# Altium footprint library Ezlo.PcbLib: 103 footprints (part 6 of 7)
Each footprint in its own frame and in the unit in brackets; x right, y up, seen from the top. Pads: shape width x height; smd on the part's side, far side on the other; paste and mask are expansions set on the pad; w line width, h text height; cw(c..) or ccw(c..) is an arc to the next point about the centre after c.
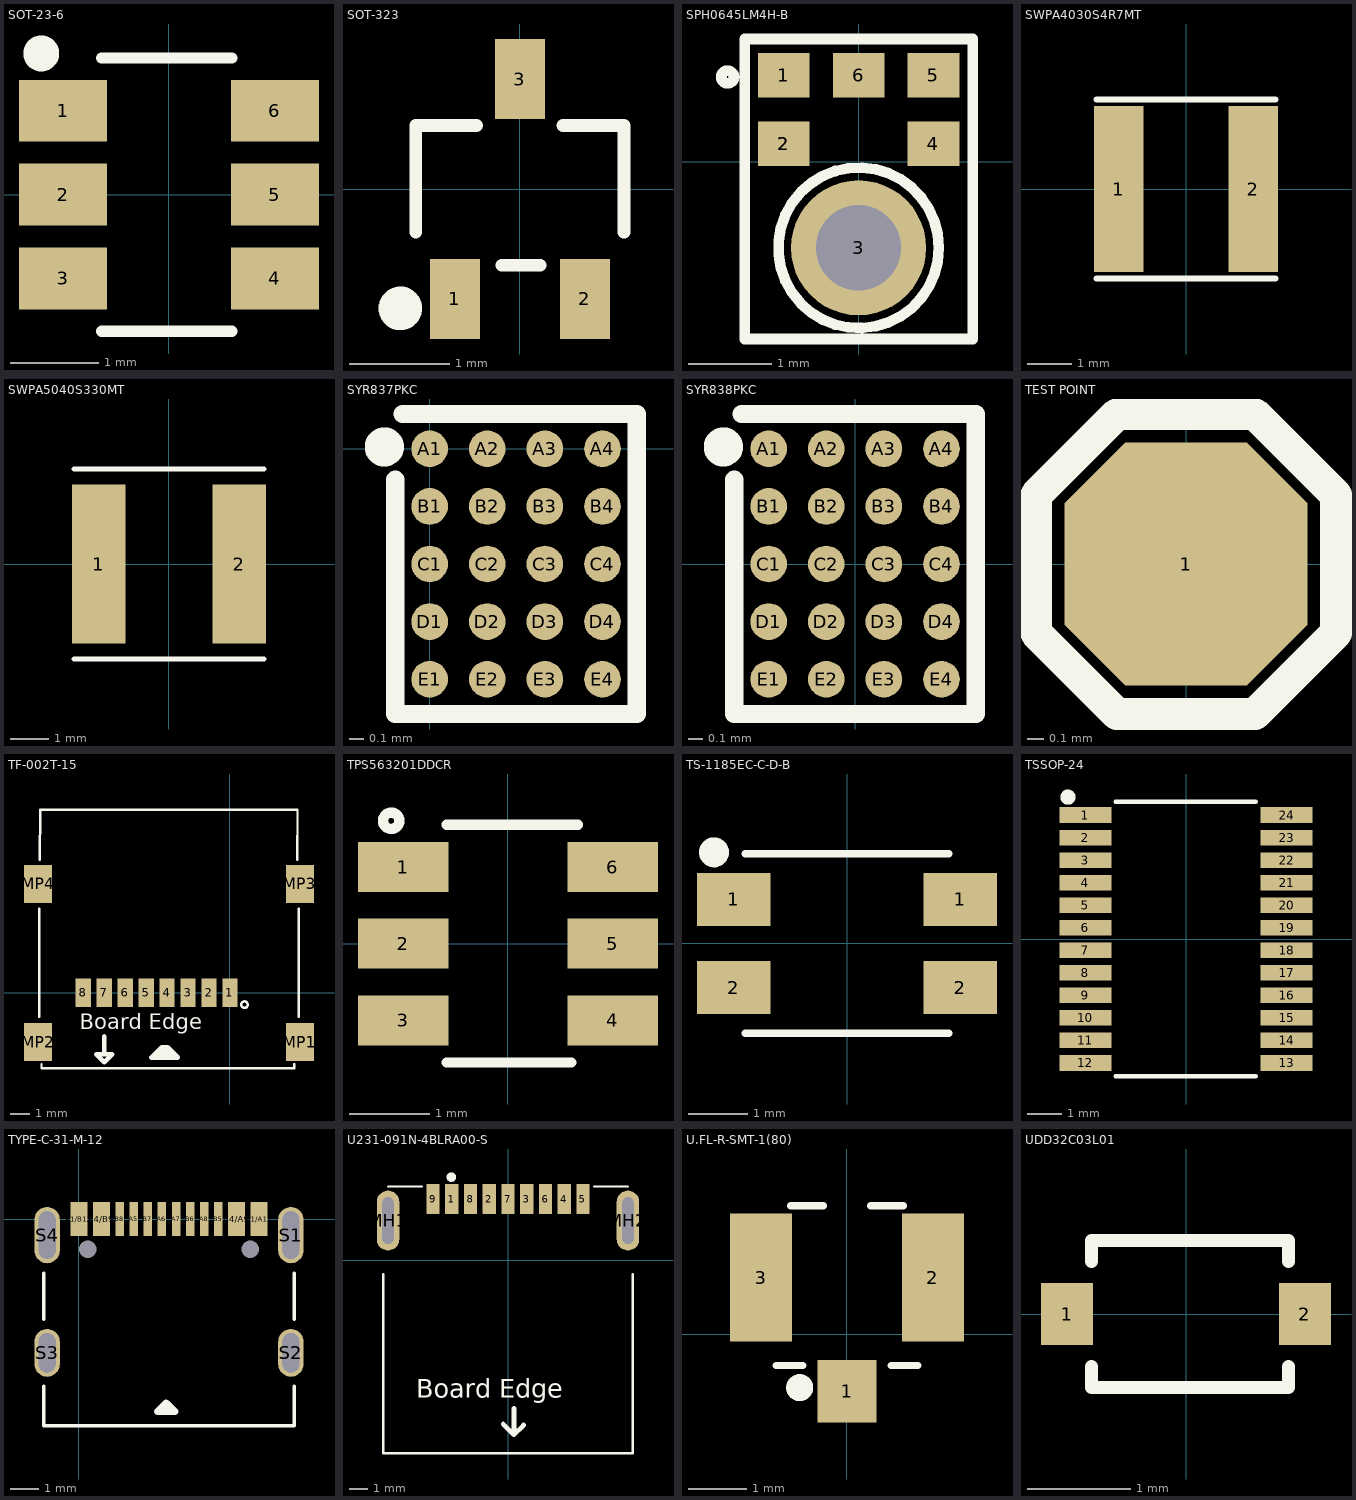
[diagram p5: the footprints below, top view; thin cyan lines are the x and y axes]

## SOT-23-6 [mm]
pads (6):
  rect 1x0.7 smd: 1(-1.2,0.95) 2(-1.2,0) 3(-1.2,-0.95) 4(1.2,-0.95) 5(1.2,0) 6(1.2,0.95)
Top Overlay:
  circle w0.254: c-1.448,1.6 r0.076
  lines w0.127: -0.762,-1.549 0.711,-1.549 ; -0.762,1.549 0.711,1.549
3D body "SOT-23-6_M6_MCH.step": height 1.45, standoff 0, extent -1.499,-1.499 1.499,1.499

## SOT-323 [mm]
pads (3):
  rect 0.5x0.8 smd: 1(-0.65,-1.1) 2(0.65,-1.1) 3(0,1.1)
Top Overlay:
  circle w0.254: c-1.194,-1.194 r0.092
  lines w0.127: -1.041,-0.432 -1.041,0.635 -0.432,0.635 ; -0.178,-0.762 0.203,-0.762 ; 0.432,0.635 1.041,0.635 1.041,-0.432
3D body "User Library-sc70-3.step": height 1, standoff 0, extent -1.05,-1.15 1.05,1.15

## SPH0645LM4H-B [mm] "MEMS Microphones DIG MEMs Mic, BP w/ I2S output"
pads (7):
  rect 0.62x0.532 smd: 1(-0.9,1.037) 2(-0.9,0.215) 2(-0.9,0.215) 4(0.9,0.215) 5(0.9,1.037) 6(0,1.037)
  round 1.624 hole 1.024: 3(0,-1.037)
Top Overlay:
  circle w0.127: c0,-1.037 r0.965
  circle w0.127: c-1.575,1.016 r0.076
  lines w0.127: -1.372,-2.134 1.372,-2.134 1.372,1.473 -1.372,1.473 -1.372,-2.134
3D body "SPH0645LM4H-B--3DModel-STEP-56544.STEP": height 1.07, standoff -0.01, extent -1.325,-2.08 1.325,1.42

## SWPA4030S4R7MT [mm]
pads (2):
  rect 1.1x3.7 smd: 1(-1.5,0) 2(1.5,0)
Top Overlay:
  lines w0.127: -2,-2 0,-2 2,-2 ; -2,2 0,2 2,2
3D body "SWPA4030S4R7MT.stp": height 3, standoff 0, extent -2,-2 2,2

## SWPA5040S330MT [mm]
pads (2):
  rect 1.4x4.2 smd: 1(-1.85,0) 2(1.85,0)
Top Overlay:
  lines w0.127: -2.5,-2.5 0,-2.5 2.5,-2.5 ; -2.5,2.5 0,2.5 2.5,2.5
3D body "SWPA_Series_DS.STEP": height 4.01, standoff 0.01, extent -2.5,-2.5 2.5,2.5

## SYR837PKC [mil]
pads (20):
  round 10 smd mask+2.17: A1(0,0) A2(15.75,0) A3(31.5,0) A4(47.24,0) B1(0,-15.75) B2(15.75,-15.75) B3(31.5,-15.75) B4(47.24,-15.75) C1(0,-31.5) C2(15.75,-31.5) C3(31.5,-31.5) C4(47.24,-31.5) D1(0,-47.24) D2(15.75,-47.24) D3(31.5,-47.24) D4(47.24,-47.24) E1(0,-62.99) E2(15.75,-62.99) E3(31.5,-62.99) E4(47.24,-62.99)
Top Overlay:
  circle w7.87: c-12.38,0.5 r1.41
  lines w5: -9.38,-8.5 -9.38,-72.5 56.62,-72.5 56.62,9.5 -7.38,9.5
3D body "SYR838PKC.stp": height 25.98, standoff 0, extent -7.09,-70.08 54.33,7.09

## SYR838PKC [mil]
pads (20):
  round 10 smd mask+2.17: A1(-23.62,31.5) A2(-7.87,31.5) A3(7.87,31.5) A4(23.62,31.5) B1(-23.62,15.75) B2(-7.87,15.75) B3(7.87,15.75) B4(23.62,15.75) C1(-23.62,0) C2(-7.87,0) C3(7.87,0) C4(23.62,0) D1(-23.62,-15.75) D2(-7.87,-15.75) D3(7.87,-15.75) D4(23.62,-15.75) E1(-23.62,-31.5) E2(-7.87,-31.5) E3(7.87,-31.5) E4(23.62,-31.5)
Top Overlay:
  circle w7.87: c-36,32 r1.41
  lines w5: -33,23 -33,-41 33,-41 33,41 -31,41
3D body "SYR838PKC.stp": height 25.98, standoff 0, extent -30.71,-38.58 30.71,38.58

## TEST POINT [mil]
pads (1):
  oct 60x60 smd: 1(0,0)
Top Overlay:
  lines w7.87: -17,-37 17,-37 ; -17,-37 -37,-17 -37,17 -17,37 ; -17,-37 17,-37 ; -17,37 17,37 ; -17,37 17,37 ; 17,-37 37,-17 37,17 17,37

## TF-002T-15 [mm] "SMD SD Card Connectors ROHS"
pads (12):
  rect 0.8x1.5 smd: 1(0,0) 2(-1.1,0) 3(-2.2,0) 4(-3.3,0) 5(-4.4,0) 6(-5.5,0) 7(-6.6,0) 8(-7.7,0)
  rect 1.45x2 smd: MP1(3.675,-2.6) MP2(-10.075,-2.6) MP3(3.675,5.7) MP4(-10.075,5.7)
Top Overlay:
  circle w0.127: c0.762,-0.635 r0.17
  region: -3.01,-2.972 -3.848,-2.972 -3.848,-3.404 -3.01,-3.404
  lines w0.127: -10.008,-1.27 -10.008,4.394 ; -9.984,6.96 -9.968,9.601 3.545,9.601 3.528,6.96 ; -9.894,-3.759 -9.894,-3.98 3.373,-3.98 3.373,-3.759 ; 3.608,-1.27 3.608,4.394
  lines w0.254: -6.6,-2.311 -6.6,-3.238 ; -6.6,-3.238 -6.19,-3.238 -6.6,-3.649 -7.01,-3.238 -6.6,-3.238 ; -4.115,-3.404 -2.743,-3.404 -3.277,-2.87 -3.581,-2.87 -4.115,-3.404
  text "Board Edge" at -7.874,-1.918 h0.8
3D body "TF-002T-15_C125616.stp": height 1.8, standoff -0.03, extent -10.465,-4.737 4.035,9.563

## TPS563201DDCR [mm]
pads (6):
  rect 1.12x0.62 smd: 1(-1.3,0.95) 2(-1.3,0) 3(-1.3,-0.95) 4(1.3,-0.95) 5(1.3,0) 6(1.3,0.95)
Top Overlay:
  circle w0.127: c-1.448,1.524 r0.102
  lines w0.127: -0.762,-1.473 0.787,-1.473 ; -0.762,1.473 0.864,1.473
3D body "User Library-SOT23-6-2.step": height 1.44, standoff -0.01, extent -1.4,-1.45 1.4,1.45

## TS-1185EC-C-D-B [mm]
pads (4):
  rect 1.25x0.9 smd: 1(-1.925,0.75) 1(1.925,0.75) 2(-1.925,-0.75) 2(1.925,-0.75)
Top Overlay:
  circle w0.254: c-2.261,1.549 r0.127
  lines w0.127: -1.727,-1.524 1.727,-1.524 ; -1.727,1.524 1.727,1.524
3D body "ts-1185ec-c-d-b.stp": height 2, standoff 0, extent -2.325,-1.5 2.325,1.5

## TSSOP-24 [mm]
pads (24):
  rect 1.5x0.45 smd: 1(-2.9,3.575) 2(-2.9,2.925) 3(-2.9,2.275) 4(-2.9,1.625) 5(-2.9,0.975) 6(-2.9,0.325) 7(-2.9,-0.325) 8(-2.9,-0.975) 9(-2.9,-1.625) 10(-2.9,-2.275) 11(-2.9,-2.925) 12(-2.9,-3.575) 13(2.9,-3.575) 14(2.9,-2.925) 15(2.9,-2.275) 16(2.9,-1.625) 17(2.9,-0.975) 18(2.9,-0.325) 19(2.9,0.325) 20(2.9,0.975) 21(2.9,1.625) 22(2.9,2.275) 23(2.9,2.925) 24(2.9,3.575)
Top Overlay:
  circle w0.254: c-3.404,4.089 r0.092
  lines w0.127: -2.032,-3.962 2.007,-3.962 ; -2.032,3.962 2.007,3.962
3D body "PCM1789TPWRQ1.STEP": height 1.2, standoff 0, extent -3.2,-3.9 3.2,3.9

## TYPE-C-31-M-12 [mm]
pads (18):
  rect 0.6x1.2 smd: A1/B12(0,0) A4/B9(0.8,0) B1/A12(6.4,0) B4/A9(5.6,0)
  rect 0.3x1.2 smd: A5(1.95,0) A6(2.95,0) A7(3.45,0) A8(4.45,0) B5(4.95,0) B6(3.95,0) B7(2.45,0) B8(1.45,0)
  round 0 hole 0.62 unplated: MH(0.31,-1.07) MH(6.09,-1.07)
  oval 0.9x2 hole 0.6 slot 1.7 at 90 deg: S1(7.525,-0.57) S4(-1.125,-0.57)
  oval 0.9x1.7 hole 0.6 slot 1.4 at 90 deg: S2(7.525,-4.75) S3(-1.125,-4.75)
Top Overlay:
  lines w0.127: -1.245,-5.944 -1.245,-7.341 7.645,-7.341 7.645,-5.944 ; -1.245,-3.556 -1.245,-1.93 ; 7.645,-3.556 7.645,-1.93
  lines w0.254: 2.794,-6.833 3.099,-6.528 3.404,-6.833 2.794,-6.833
3D body "TYPE-C-31-M-12--3DModel-STEP-56544.STEP": height 3.31, standoff -0.99, extent -1.27,-7.321 7.67,0.584

## U231-091N-4BLRA00-S [mm] "USB 3.0 1 Surface Mount 9 Female -40?~+85? Type-A SMD USB Connectors ROHS"
pads (11):
  rect 0.7x1.6 smd: 1(-3,3.275) 2(-1,3.275) 3(1,3.275) 4(3,3.275) 5(4,3.275) 6(2,3.275) 7(0,3.275) 8(-2,3.275) 9(-4,3.275)
  oval 1.2x3.2 hole 0.6 slot 2.5 at 90 deg: MH1(-6.4,2.125) MH2(6.4,2.125)
Top Overlay:
  circle w0.254: c-3.023,4.442 r0.127
  lines w0.127: -6.654,-0.737 -6.654,-10.284 6.654,-10.284 6.654,-0.737 ; -6.4,3.941 -4.584,3.941 ; 4.584,3.941 6.4,3.941
  lines w0.254: -0.253,-8.727 0.318,-9.298 ; 0.318,-7.901 0.318,-9.298 ; 0.834,-8.782 0.318,-9.298
  text "Board Edge" at -4.889,-7.314 h1
3D body "U231-091N-4BLRA00-S-1_C381140-4.STEP": height 6.84, standoff -1.81, extent -6.6,-10.288 6.6,3.912

## U.FL-R-SMT-1(80) [mm]
pads (3):
  rect 1.02x1.07 smd: 1(0,-0.974)
  rect 1.07x2.2 smd: 2(1.475,0.974) 3(-1.475,0.974)
Top Overlay:
  circle w0.254: c-0.813,-0.914 r0.105
  lines w0.127: -1.219,-0.533 -0.762,-0.533 ; -0.965,2.21 -0.406,2.21 ; 0.406,2.21 0.965,2.21 ; 0.762,-0.533 1.219,-0.533
3D body "U.FL-R-SMT-1.stp": height 1.2, standoff -0.05, extent -1.475,-0.737 1.525,2.363

## UDD32C03L01 [mm]
pads (2):
  rect 0.5x0.6 smd: 1(-1.15,0) 2(1.15,0)
Top Overlay:
  lines w0.127: -0.914,-0.508 -0.914,-0.711 0.991,-0.711 0.991,-0.508 ; -0.914,0.508 -0.914,0.711 0.991,0.711 0.991,0.508
3D body "User Library-SOD323-1.STEP": height 1.1, standoff 0, extent -1.3,-0.675 1.3,0.675